# Altium schematic symbol library Smart-PS.SchLib: 35 symbols
Pins are listed as number, name and electrical type; pins without a type are passive.

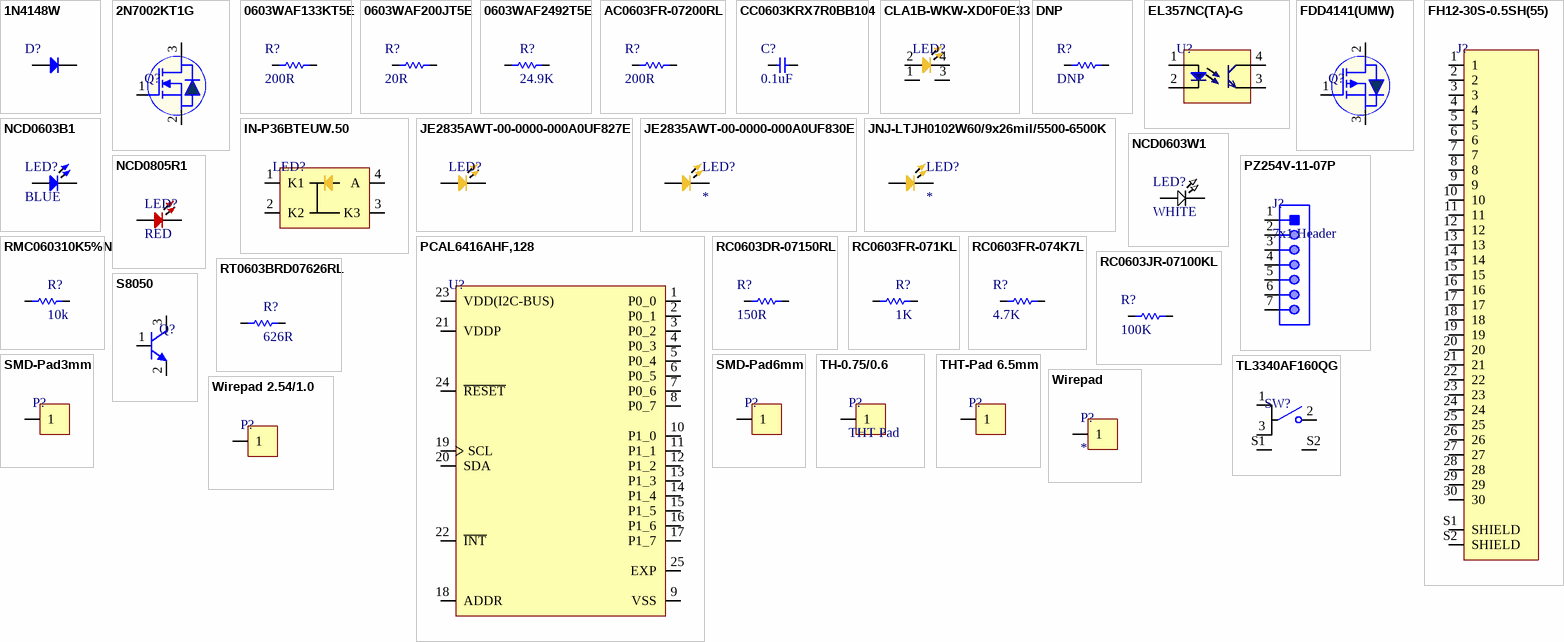
[diagram p0: symbols 1N4148W to Wirepad 2.54/1.0]

## 1N4148W
designator D?
100V 400mW Single 1.25V@150mA 8ns 300mA SOD-123 Switching Diode ROHS; Manufacturer: JSMSEMI; Manufacturer Part Number: 1N4148W; ComponentLink1Description: LCSC; ComponentLink1URL: https://www.lcsc.com/product-detail/Switching-Diode_JSMSEMI-1N4148W_C917030.html; Package: SOD-123; LCSC Part Number: C917030; Item Type: Diode
footprint SOD-123
pins: 1 A, 2 K

## 2N7002KT1G
designator Q?
MOSFET N-CH 60V 320MA SOT23-3; Manufacturer: ON Semiconductor; Manufacturer Part Number: 2N7002KT1G; Input Capacitance: 24.5pF; Max Power Dissipation: 420mW; Rds On Max: 1.6R; Rise Time: 9ns; Nominal Vgs: 2.3V; Number of Elements: 1; Power Dissipation: 300mW; Turn-Off Delay Time: 55.8ns; Turn-On Delay Time: 12.2ns; Element Configuration: Single; Gate to Source Voltage (Vgs): 20V; Polarity: N-CHANNEL; Number of Channels: 1NUMBER; Supplier: Future Electronics; Supplier Part Number: 3445699; RoHS: Yes; Category: MOSFETs; Stock: 51000; Pricing: 3000=0.0238, 12000=0.0228, 45000=0.0218, 75000=0.0215, 150000=0.0204 (USD); Case/Package: SOT-23-3; Pins: 3; Contact Plating: Tin,Matte; Min Operating Temperature: -55°C; Max Operating Temperature: 150°C; Packaging: Tape and Reel; Continuous Drain Current (ID): 320mA; Package Quantity: 1; Drain to Source Breakdown Voltage: 60V; Fall Time: 9ns; Drain to Source Resistance: 1.6R; Threshold Voltage: 2.3V; Series: -; Drain-source On Resistance-Max: 1.6R; Length: 3.04mm; Width: 1.4mm; Height: 1.01mm; Radiation Hardening: No; Reach SVHC Compliant: No; Lead Free: Lead Free; Halogen Free: Halogen Free; RoHS Compliant: Yes; ComponentLink1URL: https://datasheet.ciiva.com/1254/2n7002k-d-1254499.pdf?src-supplier=Newark; ComponentLink1Description: https://datasheet.ciiva.com/1254/2n7002k-d-1254499.pdf?src-supplier=Newark; ComponentLink2URL: https://datasheet.ciiva.com/16220/2n7002k-d-16220919.pdf?src-supplier=Future+Electronics; ComponentLink2Description: https://datasheet.ciiva.com/16220/2n7002k-d-16220919.pdf?src-supplier=Future+Electronics; ComponentLink3URL: https://datasheet.ciiva.com/936/2n7002k-d-936793.pdf?src-supplier=Digikey; ComponentLink3Description: https://datasheet.ciiva.com/936/2n7002k-d-936793.pdf?src-supplier=Digikey; LCSC Part Number: C116584; Item Type: MOSFET
footprint SOT-23 (TRANS NPN 40V 0.6A SOT23)
pins: 1 G, 2 S, 3 D

## 0603WAF133KT5E
designator R?, comment 200R
1/10W Thick Film Resistors 75V ±1% ±200ppm/℃ -55℃~+155℃ 1.33Ω 0603 Chip Resistor - Surface Mount ROHS; Manufacturer: UNI-ROYAL; Manufacturer Part Number: 0603WAF133KT5E; LCSC Part Number: C247056; Item: Resistor; Package: 0603; ComponentLink1Description: LCSC Link; ComponentLink1URL: https://lcsc.com/product-detail/Chip-span-style-background-color-ff0-Resistor-span-Surface-Mount_UNI-ROYAL-Uniroyal-Elec-0603WAF133KT5E_C247056.html
footprint Res-0603
pins: 1, 2

## 0603WAF200JT5E
designator R?, comment 20R
100mW Thick Film Resistors ±100ppm/℃ ±1% 20Ω 0603 Chip Resistor - Surface Mount ROHS; Manufacturer Part Number: 0603WAF200JT5E; Manufacturer: UNI-ROYAL(Uniroyal Elec); LCSC Part Number: C22950; Package: 0603; Item Type: Resistor; ComponentLink1Description: LCSC; ComponentLink1URL: https://www.lcsc.com/product-detail/Chip-Resistor-Surface-Mount_UNI-ROYAL-Uniroyal-Elec-0603WAF200JT5E_C22950.html
footprint Res-0603
pins: 1, 2

## 0603WAF2492T5E
designator R?, comment 24.9K
100mW Thick Film Resistors 75V ±100ppm/℃ ±1% 24.9kΩ 0603 Chip Resistor - Surface Mount ROHS; Manufacturer: UNI-ROYAL(Uniroyal Elec); Manufacturer Part Number: 0603WAF2492T5E; Package: 0603; LCSC Part Number: C25962; Item Type: Resistor; ComponentLink1Description: LCSC; ComponentLink1URL: https://www.lcsc.com/product-detail/Chip-Resistor-Surface-Mount_UNI-ROYAL-Uniroyal-Elec-0603WAF2492T5E_C25962.html
footprint Res-0603
pins: 1, 2

## AC0603FR-07200RL
designator R?, comment 200R
RES SMD 200 OHM 1% 1/10W 0603; Manufacturer: Yageo; Manufacturer Part Number: AC0603FR-07200RL; Voltage Rating: 75V; Item Type: Resistor; Supplier: Avnet; Supplier Part Number: AC0603FR-07200RL; RoHS: Yes; Category: Chip SMD Resistors; Stock: 45000; Pricing: 5000=0.00174, 10000=0.00171, 20000=0.00166 (USD); ComponentLink1URL: https://datasheet.octopart.com/AC0603FR-07200RL-Yageo-datasheet-151884373.pdf?src-supplier=Future+Electronics; ComponentLink1Description: https://datasheet.octopart.com/AC0603FR-07200RL-Yageo-datasheet-151884373.pdf?src-supplier=Future+Electronics; ComponentLink2URL: http://www.yageo.com/NewPortal/yageodocoutput?fileName=/pdf/R-Chip/PYu-AC_51_RoHS_L_6.pdf&src-supplier=Digi-Key; ComponentLink2Description: http://www.yageo.com/NewPortal/yageodocoutput?fileName=/pdf/R-Chip/PYu-AC_51_RoHS_L_6.pdf&src-supplier=Digi-Key; LCSC Part Number: C125935
footprint Res-0603
pins: 1, 2

## CC0603KRX7R0BB104
designator C?, comment 0.1uF
CAP CER 0.1UF 100V X7R 0603; Manufacturer: Yageo; Manufacturer Part Number: CC0603KRX7R0BB104; Capacitance: 100nF; Tolerance: 10%; Item Type: Capacitor; Supplier 1: Digi-Key; RoHS: Yes; Category: Ceramic Capacitors; Stock 1: 60476; Pricing 1: 1=0.19000, 10=0.13500, 50=0.07680, 100=0.06370, 500=0.04466, 1000=0.03696 (USD); Mount: Surface Mount; Case/Package: 0603; Case Code (Metric): 1608; Case Code (Imperial): 0603; Weight: 7.1E-05oz; Min Operating Temperature: -55°C; Max Operating Temperature: 125°C; Package Quantity: 4000; Voltage Rating: 100V; Packaging: Tape and Reel; Dielectric: X7R; Termination: SMD/SMT; Resistor Type: Ceramic; Voltage Rating (DC): 100V; Series: CC; Length: 0.063inch; Width: 0.031inch; Thickness: 0.035inch; Depth: 0.8mm; Lead Free: Lead Free; RoHS Compliant: Yes; ComponentLink1URL: https://datasheet.ciiva.com/6277/mlccorderingcode-6277030.pdf?src-supplier=Digi-Key; ComponentLink1Description: https://datasheet.ciiva.com/6277/mlccorderingcode-6277030.pdf?src-supplier=Digi-Key; ComponentLink2URL: https://datasheet.ciiva.com/6277/mlccorderingcode-6277081.pdf?src-supplier=Digi-Key; ComponentLink2Description: https://datasheet.ciiva.com/6277/mlccorderingcode-6277081.pdf?src-supplier=Digi-Key; ComponentLink3URL: https://datasheet.ciiva.com/6277/mlccorderingcode-6277082.pdf?src-supplier=Digi-Key; ComponentLink3Description: https://datasheet.ciiva.com/6277/mlccorderingcode-6277082.pdf?src-supplier=Digi-Key; Supplier Part Number 1: 311-1523-1-ND; LCSC Part Number: C113803
footprint Cap-0603
pins: 1, 2

## CLA1B-WKW-XD0F0E33
designator LED?
LED CLA1B-WKW/MKW COOL WHT 4PLCC; Manufacturer: Cree; Manufacturer Part Number: CLA1B-WKW-XD0F0E33; Color: White; Viewing Angle: 120°; Forward Current: 30mA; Forward Voltage: 3.2V; Luminous Intensity: 3177mcd; Lens Style: Square; Correlated Color Temperature (CCT): 8300K; Color Rendering Index (CRI): 75; Max Current Rating: 80mA; Thermal Resistance of Package: 120°C/W; Number of Elements: 1; Luminous Flux: 13.9lm; Reverse Voltage: 5V; Supplier: Rs; Supplier Part Number: 8100401; RoHS: Yes; Category: Uncategorized; Stock: 50; Pricing: 50=0.197, 250=0.192, 1000=0.186, 2500=0.182 (GBP); Mounting Technology: Surface Mount; Case/Package: PLCC; Pins: 4; Min Operating Temperature: -40°C; Max Operating Temperature: 100°C; Package Quantity: 2000; Packaging: Tape and Reel; Illumination Color: White; Test Current: 30mA; Number of LEDs: 1; Series: CLA1B-WKW/MKW; Length: 2.8mm; Depth: 3.2mm; RoHS Compliant: Yes; Reach SVHC Compliant: Unknown; ComponentLink1URL: https://datasheet.ciiva.com/2125/cla1bwkwmkw-2125216.pdf?src-supplier=Digikey; ComponentLink1Description: https://datasheet.ciiva.com/2125/cla1bwkwmkw-2125216.pdf?src-supplier=Digikey; ComponentLink2URL: https://datasheet.ciiva.com/2125/cla1bwkwmkw-2125217.pdf?src-supplier=Digikey; ComponentLink2Description: https://datasheet.ciiva.com/2125/cla1bwkwmkw-2125217.pdf?src-supplier=Digikey; ComponentLink3URL: https://datasheet.ciiva.com/7620/1761618-7620345.pdf?src-supplier=Element14; ComponentLink3Description: https://datasheet.ciiva.com/7620/1761618-7620345.pdf?src-supplier=Element14; ComponentLink4URL: https://datasheet.ciiva.com/2125/cla1bwkwmkw-2125215.pdf?src-supplier=Digikey; ComponentLink4Description: https://datasheet.ciiva.com/2125/cla1bwkwmkw-2125215.pdf?src-supplier=Digikey; ComponentLink5URL: https://datasheet.ciiva.com/33113/cla1b-wkw-xd0f0e33-33113531.pdf?src-supplier=Today+Components; ComponentLink5Description: https://datasheet.ciiva.com/33113/cla1b-wkw-xd0f0e33-33113531.pdf?src-supplier=Today+Components; Item Type: LED
footprint CLA1B-WKW-XD0F0E33
pins: 1 NC, 2 Anode, 3 NC, 4 Cathode

## DNP
designator R?
Item Type: Resistor; Package: 0603; ComponentLink1Description: LCSC
footprint Res-0603
pins: 1, 2

## EL357NC(TA)-G
designator U?
OPTOISOLATOR 3.75KV TRANS 4-SOP; Manufacturer: Everlight; Manufacturer Part Number: EL357NC(TA)-G; Number of Channels: 1; Max Power Dissipation: 200mW; Output Voltage: 80V; Output Current per Channel: 50mA; Collector Emitter Saturation Voltage: 200mV; Input Type: DC; Approvals: UL; Item Type: IC; Supplier: Digikey; Supplier Part Number: EL357NC(TA)-G-ND; RoHS: Yes; Category: Optocouplers; Mounting Technology: Surface Mount; Case/Package: SMD/SMT; Pins: 4; Min Operating Temperature: -55°C; Max Operating Temperature: 110°C; Package Quantity: 3000; Packaging: Tape and Reel; Max Collector Current: 50mA; Max Input Current: 50mA; Collector-emitter Voltage-Max: 200mV; Collector Emitter Breakdown Voltage: 80V; Radiation Hardening: No; ComponentLink1URL: https://datasheet.ciiva.com/26302/el357n-g-eng-tds-26302501.pdf?src-supplier=Distrelec; ComponentLink1Description: https://datasheet.ciiva.com/26302/el357n-g-eng-tds-26302501.pdf?src-supplier=Distrelec; ComponentLink2URL: https://datasheet.ciiva.com/2089/201407061738295695-2089328.pdf?src-supplier=Digikey; ComponentLink2Description: https://datasheet.ciiva.com/2089/201407061738295695-2089328.pdf?src-supplier=Digikey; LCSC Part Number: C29981
footprint EL357N(C)(TA)-G
pins: 1 An, 2 Ca, 3 E, 4 C

## FDD4141(UMW)
designator Q?
TO-252 MOSFETs ROHS; Manufacturer: UMW; Manufacturer Part Number: FDD4141(UMW); Item Type: MOSFET; Package: TO-252; LCSC Part Number: C5346825
footprint TO-252-2L
pins: 1 G, 2 D, 3 S

## FH12-30S-0.5SH(55)
designator J?
CONN FFC BOTTOM 30POS 0.5MM R/A; Manufacturer: Hirose; Manufacturer Part Number: FH12-30S-0.5SH(55); Actuator Material: Polyphenylene; Actuator Color: Brown; Contact Resistance: 50mR; Current Rating: 500mA; Gender: Female; Voltage Rating: 50V; Max Current Rating: 400mA; Mating Cycles: 20; Number of Positions: 30; Insulation Resistance: 500MR; Wire/Cable Type: Straight; Connector Type: 4640ConnectorType; Contact Pitch: 500um; Item Type: FFC/FPC Connector; Supplier: Future Electronics; Supplier Part Number: 7018136; RoHS: Yes; Category: FFC / FPC; Stock: 1200; Pricing: 1=2.27, 15=2.07, 50=1.97, 250=1.85, 1000=1.75 (USD); Mounting Technology: Surface Mount; Contact Material: Bronze; Contact Plating: Gold; Color: Beige,Brown; Housing Color: Beige; Housing Material: Polyamide; Material: Polyamide; Min Operating Temperature: -40°C; Max Operating Temperature: 70°C; Number of Rows: 1; Package Quantity: 2000; Packaging: Tape and Reel; Voltage Rating (AC): 50V; Termination: Solder; Number of Contacts: 30; Max Voltage Rating (AC): 50V; Orientation: Right Angle; Series: FH12; Contact Location: Bottom; Contact Voltage Rating (AC): 50V; Length: 19.1mm; Width: 19.1mm; Lead Pitch: 0.5mm; Pitch: 0.5mm; Depth: 5.6mm; Radiation Hardening: No; Reach SVHC Compliant: No; Lead Free: Lead Free; Flammability Rating: UL94 V-0; RoHS Compliant: Yes; ComponentLink1URL: https://datasheet.ciiva.com/11745/0900766b80d985fc-11745247.pdf?src-supplier=Rs; ComponentLink1Description: https://datasheet.ciiva.com/11745/0900766b80d985fc-11745247.pdf?src-supplier=Rs; ComponentLink2URL: https://datasheet.ciiva.com/15176/getdatasheetpartid-439676-15176854.pdf?src-supplier=Verical; ComponentLink2Description: https://datasheet.ciiva.com/15176/getdatasheetpartid-439676-15176854.pdf?src-supplier=Verical; ComponentLink3URL: https://datasheet.ciiva.com/7661/58803-7661387.pdf?src-supplier=Element14; ComponentLink3Description: https://datasheet.ciiva.com/7661/58803-7661387.pdf?src-supplier=Element14; ComponentLink4URL: https://datasheet.ciiva.com/22630/58803-22630360.pdf?src-supplier=Farnell; ComponentLink4Description: https://datasheet.ciiva.com/22630/58803-22630360.pdf?src-supplier=Farnell; LCSC Part Number: C506793
footprint FH12-30S-0.5SH(55)
pins: 1, 2, 3, 4, 5, 6, 7, 8, 9, 10, 11, 12, 13, 14, 15, 16, 17, 18, 19, 20, 21, 22, 23, 24, 25, 26, 27, 28, 29, 30, S1 SHIELD, S2 SHIELD

## IN-P36BTEUW.50
designator LED?
LED WHITE DIFFUSED 4PLCC SMD; Manufacturer: Inolux; Manufacturer Part Number: IN-P36BTEUW.50; Supplier: Digikey; Supplier Part Number: 1830-IN-P36BTEUW.50CT-ND; RoHS: No; Category: LEDs; Stock: 8620; Pricing: 1=0.6, 10=0.394, 100=0.2606, 1000=0.20119 (USD); Item Type: LED
footprint IN-P36BTEUW.50
pins: 1 K1, 2 K2, 3 K3, 4 A

## JE2835AWT-00-0000-000A0UF827E
designator LED?
LED J WARM WHT 2700K SMD; Manufacturer: Cree; Manufacturer Part Number: JE2835AWT-00-0000-000A0UF827E; Color: White; Test Current: 150mA; Forward Voltage: 3V; Color Rendering Index (CRI): 90; Max Current Rating: 240mA; Viewing Angle: 120°; Thermal Resistance of Package: 20°C/W; Item Type: Warm LED; Supplier: Digikey; Supplier Part Number: JE2835AWT-00-0000-000A0UF827ECT-ND; RoHS: Yes; Category: LEDs; Stock: 1489; Pricing: 1=0.1, 10=0.043, 100=0.0383, 500=0.03166, 1000=0.02833 (USD); Mounting Technology: Surface Mount; Case/Package: 1113; Correlated Color Temperature (CCT): 2700K; Series: J; RoHS Compliant: Yes; ComponentLink1URL: http://www.farnell.com/datasheets/2602667.pdf?src-supplier=Farnell; ComponentLink1Description: http://www.farnell.com/datasheets/2602667.pdf?src-supplier=Farnell; ComponentLink2URL: https://www.cree.com/led-components/media/documents/data-sheet-JSeries-2835.pdf?src-supplier=Digikey; ComponentLink2Description: https://www.cree.com/led-components/media/documents/data-sheet-JSeries-2835.pdf?src-supplier=Digikey; ComponentLink3URL: http://www.farnell.com/datasheets/2602667.pdf?src-supplier=Element14; ComponentLink3Description: http://www.farnell.com/datasheets/2602667.pdf?src-supplier=Element14; ComponentLink4URL: http://www.farnell.com/datasheets/2602667.pdf?src-supplier=Newark; ComponentLink4Description: http://www.farnell.com/datasheets/2602667.pdf?src-supplier=Newark
footprint JE2835AWT-00-0000-000A0UF827E
pins: 1, 2

## JE2835AWT-00-0000-000A0UF830E
designator LED?
Led, Hb, Warm White, 3000K, 59LM Rohs Compliant: Yes; Manufacturer: Cree; Manufacturer Part Number: JE2835AWT-00-0000-000A0UF830E; Test Current: 150mA; Forward Voltage: 3V; Color Rendering Index (CRI): 90; Max Current Rating: 240mA; Viewing Angle: 120°; Thermal Resistance of Package: 20°C/W; Supplier: Arrow Electronics; Supplier Part Number: JE2835AWT-00-0000-000A0UF830E; RoHS: Yes; Category: Uncategorized; Stock: 52000; Pricing: 4000=0.021, 8000=0.0193, 12000=0.0191, 20000=0.0189, 24000=0.0187, 100000=0.0185 (USD); Mounting Technology: Surface Mount; Case/Package: 1113; Color: White; Correlated Color Temperature (CCT): 3000K; Series: J; RoHS Compliant: Yes; ComponentLink1URL: https://www.cree.com/led-components/media/documents/data-sheet-JSeries-2835.pdf?src-supplier=Digikey; ComponentLink1Description: https://www.cree.com/led-components/media/documents/data-sheet-JSeries-2835.pdf?src-supplier=Digikey
footprint JE2835AWT-00-0000-000A0UF827E
pins: 1, 2

## JNJ-LTJH0102W60/9x26mil/5500-6500K
designator LED?
150mA 5500K~6500K 48000mcd -40℃~+100℃ White 60° 3V~3.6V 2835 Light Emitting Diodes (LED) ROHS; Manufacturer: JNJ OPTOELECTRONICS; Manufacturer Part Number: JNJ-LTJH0102W60/9x26mil/5500-6500K; LCSC Part Number: C7500119; Package: 2835; Item: LED; ComponentLink1Description: LCSC; ComponentLink1URL: https://www.lcsc.com/product-detail/Light-Emitting-Diodes-LED_JNJ-OPTOELECTRONICS-JNJ-LTJH0102W60-9x26mil-5500-6500K_C7500119.html
footprint JNJ-LTJH0102W60/9x26mil/5500-6500K
pins: 1, 2

## NCD0603B1
designator LED?, comment BLUE
10mA 无色透明透镜 80mcd~220mcd 463nm~475nm -30℃~+85℃ Blue 130° 72mW 2.6V~3.6V 0603 Light Emitting Diodes (LED) ROHS; Manufacturer: Foshan NationStar Optoelectronics; Manufacturer Part Number: NCD0603B1; Package: 0603; LCSC Part Number: C84266; Item Type: LED; ComponentLink1Description: LCSC; ComponentLink1URL: https://www.lcsc.com/product-detail/Light-Emitting-Diodes-LED_Foshan-NationStar-Optoelectronics-NCD0603B1_C84266.html
footprint LED-0603
pins: 1, 2

## NCD0603W1
designator LED?, comment WHITE
5mA 200mcd~300mcd 雾状黄透镜 -30℃~+85℃ White 130° 72mW 2.6V~3.6V 0603 Light Emitting Diodes (LED) ROHS; Manufacturer: Foshan NationStar Optoelectronics; Manufacturer Part Number: NCD0603W1; Package: 0603; LCSC Part Number: C84265; Item Type: LED; ComponentLink1Description: LCSC; ComponentLink1URL: https://www.lcsc.com/product-detail/Light-Emitting-Diodes-LED_Foshan-NationStar-Optoelectronics-NCD0603W1_C84265.html
footprint LED-0603
pins: 1, 2

## NCD0805R1
designator LED?, comment RED
20mA  67mcd~195mcd -30℃~+85℃ 615nm~630nm  Red 130° 65mW 1.6V~2.6V 0805 Light Emitting Diodes (LED) ROHS; Manufacturer: Foshan NationStar Optoelectronics; Manufacturer Part Number: NCD0805R1; Package: 0805; LCSC Part Number: C84256; Item Type: LED; ComponentLink1Description: LCSC; ComponentLink1URL: https://www.lcsc.com/product-detail/Light-Emitting-Diodes-LED_Foshan-NationStar-Optoelectronics-NCD0805R1_C84256.html
footprint LED-0805
pins: 1, 2

## PCAL6416AHF,128
designator U?
IC XPND 400KHZ I2C SMBUS 24HWQFN; Manufacturer: NXP Semiconductors; Manufacturer Part Number: PCAL6416AHF,128; Min Supply Voltage: 1.65V; Max Supply Voltage: 5.5V; Output Current: 25mA; Number of I/Os: 16; Clock Frequency: 100kHz; Nominal Supply Current: 1.1mA; Supplier: Avnet; Supplier Part Number: 75X0096; RoHS: Yes; Category: Interface ICs; Stock: 5086; Pricing: 1=1.23, 10=1.05, 25=0.969, 50=0.887 (USD); Mounting Technology: Surface Mount; Pins: 24; Min Operating Temperature: -40°C; Max Operating Temperature: 85°C; Packaging: Tape and Reel; Package Quantity: 1; Interface: I2C; Frequency: 400kHz; Series: -; Height: 800um; Reach SVHC Compliant: No; Lead Free: Lead Free; RoHS Compliant: Yes; ComponentLink1URL: https://datasheet.ciiva.com/46433/1845292-46433847.pdf?src-supplier=Element14; ComponentLink1Description: https://datasheet.ciiva.com/46433/1845292-46433847.pdf?src-supplier=Element14; ComponentLink2URL: https://datasheet.ciiva.com/6633/pcal6416a-6633094.pdf?src-supplier=Digikey; ComponentLink2Description: https://datasheet.ciiva.com/6633/pcal6416a-6633094.pdf?src-supplier=Digikey; ComponentLink3URL: https://datasheet.ciiva.com/6633/pcal6416a-6633096.pdf?src-supplier=Digikey; ComponentLink3Description: https://datasheet.ciiva.com/6633/pcal6416a-6633096.pdf?src-supplier=Digikey; LCSC Part Number: C2652287; Item Type: IC
footprint QFN-24-EP(4x4)
pins: 1 P0_0, 2 P0_1, 3 P0_2, 4 P0_3, 5 P0_4, 6 P0_5, 7 P0_6, 8 P0_7, 9 VSS, 10 P1_0, 11 P1_1, 12 P1_2, 13 P1_3, 14 P1_4, 15 P1_5, 16 P1_6, 17 P1_7, 18 ADDR, 19 SCL, 20 SDA, 21 VDDP, 22 ~{INT}, 23 VDD(I2C-BUS), 24 ~{RESET}, 25 EXP

## PZ254V-11-07P
designator J?, comment 7x1 Header  (no BOM)
Manufacturer: XFCN; Manufacturer Part Number: PZ254V-11-07P; LCSC Part Number: C492406; Package: 2.54mm; Item Type: Header; ComponentLink1Description: LCSC; ComponentLink1URL: https://www.lcsc.com/product-detail/Pin-Headers_XFCN-PZ254V-11-07P_C492406.html
footprint HDR 1X7
pins: 1, 2, 3, 4, 5, 6, 7

## RC0603DR-07150RL
designator R?, comment 150R
RES 150 OHM 0.5% 1/10W 0603; Manufacturer: Yageo; Manufacturer Part Number: RC0603DR-07150RL; Max Power Dissipation: 100mW; Temperature Coefficient: 100ppm/°C; Item Type: Resistor; Supplier 1: Avnet; RoHS: Yes; Category: Chip SMD Resistors; Pricing 1: 5000=0.00430, 10000=0.00424, 20000=0.00411 (USD); Case/Package: 0603; Min Operating Temperature: -55°C; Max Operating Temperature: 155°C; Packaging: Tape and Reel; Resistance: 150R; Resistor Type: Thick Film; Number of Terminations: 2; Tolerance: 0.5%; Features: Moisture Resistant; Length: 0.063inch; Width: 0.031inch; Height: 0.022inch; RoHS Compliant: Yes; ComponentLink1URL: http://www.yageo.com.tw/exep/pages/download/literatures/PYu-R_INT-thick_7.pdf?src-supplier=Digi-Key; ComponentLink1Description: http://www.yageo.com.tw/exep/pages/download/literatures/PYu-R_INT-thick_7.pdf?src-supplier=Digi-Key; Supplier Part Number 1: RC0603DR-07150RL; LCSC Part Number: C471801
footprint Res-0603
pins: 1, 2

## RC0603FR-071KL
designator R?, comment 1K
100mW Thick Film Resistors 75V ±100ppm/℃ ±1% 1kΩ 0603 Chip Resistor - Surface Mount ROHS; Manufacturer: YAGEO; Manufacturer Part Number: RC0603FR-071KL; LCSC Part Number: C22548; Package: 0603; Item: Resistor; ComponentLink1Description: LCSC; ComponentLink1URL: https://www.lcsc.com/product-detail/Chip-Resistor-Surface-Mount_YAGEO-RC0603FR-071KL_C22548.html
footprint Res-0603
pins: 1, 2

## RC0603FR-074K7L
designator R?, comment 4.7K
RES SMD 4.7K OHM 1% 1/10W 0603; Manufacturer: Yageo; Manufacturer Part Number: RC0603FR-074K7L; Item Type: Resistor; Package: 0603; ComponentLink7Description: LCSC; ComponentLink7URL: https://www.lcsc.com/product-detail/Chip-Resistor-Surface-Mount_YAGEO-RC0603FR-074K7L_C99782.html; LCSC Part Number: C99782
footprint Res-0603
pins: 1, 2

## RC0603JR-07100KL
designator R?, comment 100K
RES 100K OHM 5% 1/10W 0603; Manufacturer: Yageo; Manufacturer Part Number: RC0603JR-07100KL; Resistance: 100kR; Temperature Coefficient: 100ppm/°C; Voltage Rating: 50V; Power Rating: 100mW; Item Type: Resistor; Supplier 1: Digi-Key; RoHS: Yes; Category: Chip SMD Resistors; Stock 1: 1210037; Pricing 1: 1=0.10000, 10=0.02000, 100=0.00800, 1000=0.00360, 2500=0.00312 (USD); Case/Package: 0603; Number of Pins: 2; Contact Plating: Tin,Matte; Case Code (Imperial): 0603; Case Code (Metric): 1608; Size Code: 0603; Min Operating Temperature: -55°C; Max Operating Temperature: 155°C; Tolerance: 5%; Resistor Type: Thick Film; Packaging: Tape and Reel; Voltage Rating (DC): 50V; Termination: SMD/SMT; Features: Moisture Resistant; Series: RC; Max Power Dissipation: 100mW; Number of Terminations: 2; Resistance Tolerance: 5%; Width: 0.8mm; Radiation Hardening: No; REACH SVHC: No SVHC; Lead Free: Lead Free; RoHS Compliant: Yes; ComponentLink1URL: https://datasheet.ciiva.com/7746/443971-7746424.pdf?src-supplier=Element14; ComponentLink1Description: https://datasheet.ciiva.com/7746/443971-7746424.pdf?src-supplier=Element14; ComponentLink2URL: https://datasheet.ciiva.com/7983/443971-7983686.pdf?src-supplier=Element14; ComponentLink2Description: https://datasheet.ciiva.com/7983/443971-7983686.pdf?src-supplier=Element14; ComponentLink3URL: https://datasheet.ciiva.com/7746/443971-7746423.pdf?src-supplier=Element14; ComponentLink3Description: https://datasheet.ciiva.com/7746/443971-7746423.pdf?src-supplier=Element14; ComponentLink4URL: https://datasheet.ciiva.com/8887/pyu-rc0603-51-rohs-l-4-8887903.pdf?src-supplier=Avnet; ComponentLink4Description: https://datasheet.ciiva.com/8887/pyu-rc0603-51-rohs-l-4-8887903.pdf?src-supplier=Avnet; Supplier Part Number 1: 311-100KGRCT-ND; LCSC Part Number: C100048
footprint Res-0603
footprint Res-0603
pins: 1, 2

## RMC060310K5%N
designator R?, comment 10k
100mW ±5% 10kΩ 0603 Chip Resistor - Surface Mount ROHS; Manufacturer: TyoHM; Manufacturer Part Number: RMC060310K5%N; LCSC Part Number: C269684; Package: 0603; Item Type: Resistor; ComponentLink1Description: LCSC; ComponentLink1URL: https://www.lcsc.com/product-detail/Chip-span-style-background-color-ff0-Resistor-span-Surface-Mount_TyoHM-RMC060310K5-N_C269684.html
footprint Res-0603
pins: 1, 2

## RT0603BRD07626RL
designator R?, comment 626R
100mW Thin Film Resistor ±25ppm/℃ ±0.1% 626Ω 0603 Chip Resistor - Surface Mount ROHS; Manufacturer: YAGEO; Manufacturer Part Number: RT0603BRD07626RL; LCSC Part Number: C861502; Package: 0603; Item: Resistor; ComponentLink1Description: LCSC; ComponentLink1URL: https://www.lcsc.com/product-detail/Chip-span-style-background-color-ff0-Resistor-span-Surface-Mount_YAGEO-RT0603BRD07626RL_C861502.html
footprint Res-0603
pins: 1, 2

## S8050
designator Q?
Trans Gp Bjt NPN 25V 1.5A 300MW 3-PIN SOT-23 T/r; Manufacturer: Comchip; Manufacturer Part Number: SS8050-G; Transition Frequency: 100MHz; Collector-emitter Voltage-Max: 400mV; Collector Base Voltage (VCBO): 40V; Collector Emitter Saturation Voltage: 500mV; Emitter Base Voltage (VEBO): 5V; hFE Min: 200NUMBER; Number of Elements: 1NUMBER; Supplier: Digikey; Supplier Part Number: 641-1790-1-ND; RoHS: Yes; Category: Transistors; Stock: 180180; Pricing: 1=0.29, 10=0.2, 100=0.0978, 500=0.08154, 1000=0.05666 (USD); Mounting Technology: Surface Mount; Case/Package: TO-236-3; Max Operating Temperature: 150°C; Packaging: Cut Tape; Max Collector Current: 1.5A; Max Power Dissipation: 300mW; Collector Emitter Breakdown Voltage: 25V; Max Breakdown Voltage: 25V; Series: -; Power Dissipation: 300mW; Height: 1.15mm; RoHS Compliant: Yes; ComponentLink1URL: http://www.comchiptech.com/admin/files/product/SS8050-G RevA181526.pdf?src-supplier=Digikey; ComponentLink1Description: http://www.comchiptech.com/admin/files/product/SS8050-G RevA181526.pdf?src-supplier=Digikey; LCSC Part Number: C105433
footprint SOT-23 (TRANS NPN 40V 0.6A SOT23)
pins: 1 B, 2 E, 3 C

## SMD-Pad3mm
designator P?  (no BOM)
Wire Conncting PAD
footprint 3mm SMD PAD
pins: 1

## SMD-Pad6mm
designator P?  (no BOM)
footprint 6.0mm-SMD Pad
pins: 1

## TH-0.75/0.6
designator P?, comment THT Pad  (no BOM)
footprint TH-0.75/0.6
pins: 1

## THT-Pad 6.5mm
designator P?  (no BOM)
footprint 6.5mm-THTPad
pins: 1

## TL3340AF160QG
designator SW?
Switch Tactile N.O. SPST Round Button Gull Wing 0.05A 12VDC 100000Cycles 1.57N SMD; Manufacturer: E-Switch; Manufacturer Part Number: TL3340AF160QG; Actuator Material: Polyphthalamide; Number of Positions: 2NUMBER; Contact Current Rating: 50mA; Operating Force: 160gf; Voltage Rating (DC): 12V; Contact Resistance: 500mR; Illumination Type: Non-Illuminated,Illuminated; Switch Travel: 0.2mm; Switch Function: Off-Mom; Actuator Type: Standard; Actuator Length: 0.85mm; Supplier: Future Electronics; Supplier Part Number: 9232661; RoHS: Yes; Category: Tactile Switches; Stock: 16000; Pricing: 2000=0.27 (USD); Mounting Technology: Surface Mount; Case/Package: SMD/SMT; Contact Material: Stainless Steel,Silver; Contact Plating: Stainless Steel,Silver; Color: White; Mechanical Life: 100000Cycles; Housing Material: Polyphthalamide; Min Operating Temperature: -35°C; Max Operating Temperature: 85°C; Throw Configuration: SPST; Package Quantity: 1; Packaging: Tape and Reel; Current Rating: 50mA; Max Voltage Rating (DC): 12V; Termination: Gull Wing; Electrical Life: 100000Cycles; Orientation: Right Angle; Series: TL3340; Height: 3.55mm; Size: 3.3mm; Reach SVHC Compliant: No; Lead Free: 5697LeadFree; RoHS Compliant: Yes; ComponentLink1URL: https://datasheet.ciiva.com/7637/tl3340-7637667.pdf?src-supplier=Element14; ComponentLink1Description: https://datasheet.ciiva.com/7637/tl3340-7637667.pdf?src-supplier=Element14; ComponentLink2URL: https://datasheet.ciiva.com/5284/tl3340-28153-5284108.pdf?src-supplier=Mouser; ComponentLink2Description: https://datasheet.ciiva.com/5284/tl3340-28153-5284108.pdf?src-supplier=Mouser; ComponentLink3URL: https://datasheet.ciiva.com/2900/p021301b-2900825.pdf?src-supplier=Digikey; ComponentLink3Description: https://datasheet.ciiva.com/2900/p021301b-2900825.pdf?src-supplier=Digikey; ComponentLink4URL: https://datasheet.ciiva.com/2900/p021301b-2900826.pdf?src-supplier=Digikey; ComponentLink4Description: https://datasheet.ciiva.com/2900/p021301b-2900826.pdf?src-supplier=Digikey; ComponentLink5URL: https://datasheet.ciiva.com/2900/p021301b-2900827.pdf?src-supplier=Digikey; ComponentLink5Description: https://datasheet.ciiva.com/2900/p021301b-2900827.pdf?src-supplier=Digikey
footprint TL3340AF160QG
pins: 1 COM 1, 2 NO, 3 COM 2, S1 GND, S2 GND

## Wirepad
designator P?
footprint Wirepad
pins: 1

## Wirepad 2.54/1.0
designator P?  (no BOM)
footprint Wirepad 2.54/1.0
pins: 1